# Altium footprint library ERA-2AED103X.PcbLib: 3 footprints
Each footprint in its own frame and in the unit in brackets; x right, y up, seen from the top. Pads: shape width x height; smd on the part's side, far side on the other; paste and mask are expansions set on the pad; w line width, h text height; cw(c..) or ccw(c..) is an arc to the next point about the centre after c.
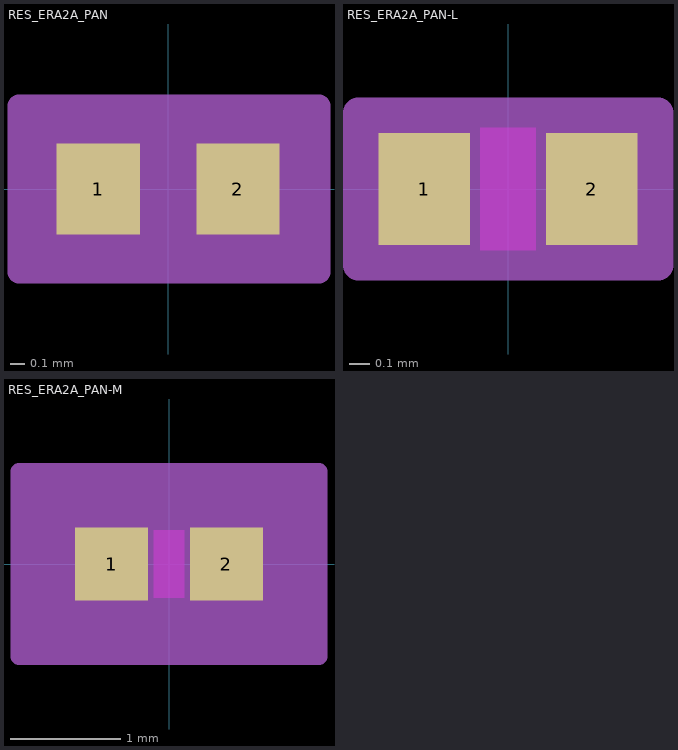
[diagram p0: the footprints below, top view; thin cyan lines are the x and y axes]

## RES_ERA2A_PAN [mil]
pads (2):
  rect 22x24 smd paste+0 mask+0: 1(-18.5,0) 2(18.5,0)
Top Courtyard:
  lines w0.39: -39.37,-21.65 39.37,-21.65 39.37,21.66 -39.37,21.66 -39.37,-21.65
Mechanical 13:
  lines w1: -21.5,-12 -21.5,12 ; -21.5,-12 21.5,-12 ; -21.5,-12 -7.5,-12 -7.5,12 -21.5,12 ; -21.5,-12 -21.5,12 ; -21.5,12 21.5,12 ; 21.5,-12 21.5,12 ; 21.5,-12 21.5,12 ; 21.5,-12 7.5,-12 7.5,12 21.5,12
Mechanical 15:
  region: 39.5,-22 -39.5,-22 -39.5,22 39.5,22
  lines w6: -39.5,-22 40,-22 40,22 -39.5,22 -39.5,-22
3D body "RES_ERA2A_PAN.step": height 15.98, standoff 0, extent -21.5,-12.01 21.5,12.01

## RES_ERA2A_PAN-L [mil]
pads (2):
  rect 18x22 smd paste+0 mask+0: 1(-16.5,0) 2(16.5,0)
Top Layer keep-out:
  region: -5.5,-10 -5.5,10 5.5,10 5.5,-10
Top Overlay:
  text ".Designator" at -137.5,-25 h50
Keep-Out Layer:
  region: -5.5,-12 -5.5,12 5.5,12 5.5,-12
Mechanical 13:
  lines w1: -21.5,-12 -21.5,12 ; -21.5,-12 -7.5,-12 -7.5,12 -21.5,12 ; -21.5,-12 21.5,-12 ; -21.5,-12 -21.5,12 ; -21.5,12 21.5,12 ; 21.5,-12 7.5,-12 7.5,12 21.5,12 ; 21.5,-12 21.5,12 ; 21.5,-12 21.5,12
  text ".Designator" at -137.5,-25 h50
Mechanical 15:
  region: 29.5,-15 -29.5,-15 -29.5,15 29.5,15
  lines w6: -29.5,-15 -29.5,15 29.5,15 29.5,-15 -29.5,-15
3D body "RES_ERA2A_PAN.step": height 15.98, standoff 0, extent -21.5,-12.01 21.5,12.01

## RES_ERA2A_PAN-M [mil]
pads (2):
  rect 26x26 smd paste+0 mask+0: 1(-20.5,0) 2(20.5,0)
Top Layer keep-out:
  region: -5.5,-10 -5.5,10 5.5,10 5.5,-10
Top Overlay:
  text ".Designator" at -137.5,-25 h50
Keep-Out Layer:
  region: -5.5,-12 -5.5,12 5.5,12 5.5,-12
Mechanical 13:
  lines w1: -21.5,-12 -21.5,12 ; -21.5,-12 -7.5,-12 -7.5,12 -21.5,12 ; -21.5,-12 21.5,-12 ; -21.5,-12 -21.5,12 ; -21.5,12 21.5,12 ; 21.5,-12 7.5,-12 7.5,12 21.5,12 ; 21.5,-12 21.5,12 ; 21.5,-12 21.5,12
  text ".Designator" at -137.5,-25 h50
Mechanical 15:
  region: 53.5,-33 -53.5,-33 -53.5,33 53.5,33
  lines w6: -53.5,-33 -53.5,33 53.5,33 53.5,-33 -53.5,-33
3D body "RES_ERA2A_PAN.step": height 15.98, standoff 0, extent -21.5,-12.01 21.5,12.01